# Altium schematic symbol library ERA2AEB101X.SchLib: 1 symbol
Pins are listed as number, name and electrical type; pins without a type are passive.

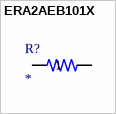
[diagram p0: symbol ERA2AEB101X]

## ERA2AEB101X
designator R?
100 Ohms ±0.1% 0.063W, 1/16W Chip Resistor 0402 (1005 Metric) Automotive AEC-Q200 Thin Film; MP: ERA2AEB101X; Availability: Unavailable; Package: None; Value: *; Price: None
footprint RES_ERA2AEB101X
pins: 1, 2